# Altium schematic symbol library PrzetwornicaBOOST.SchLib: 1 symbol
Pins are listed as number, name and electrical type; pins without a type are passive.

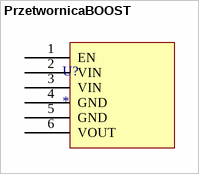
[diagram p0: symbol PrzetwornicaBOOST]

## PrzetwornicaBOOST
designator U?
footprint U3V40F5
pins: 1 EN, 2 VIN, 3 VIN, 4 GND, 5 GND, 6 VOUT